# Altium footprint library slave-mc33771c.PcbLib: 66 footprints (part 2 of 5)
Each footprint in its own frame and in the unit in brackets; x right, y up, seen from the top. Pads: shape width x height; smd on the part's side, far side on the other; paste and mask are expansions set on the pad; w line width, h text height; cw(c..) or ccw(c..) is an arc to the next point about the centre after c.
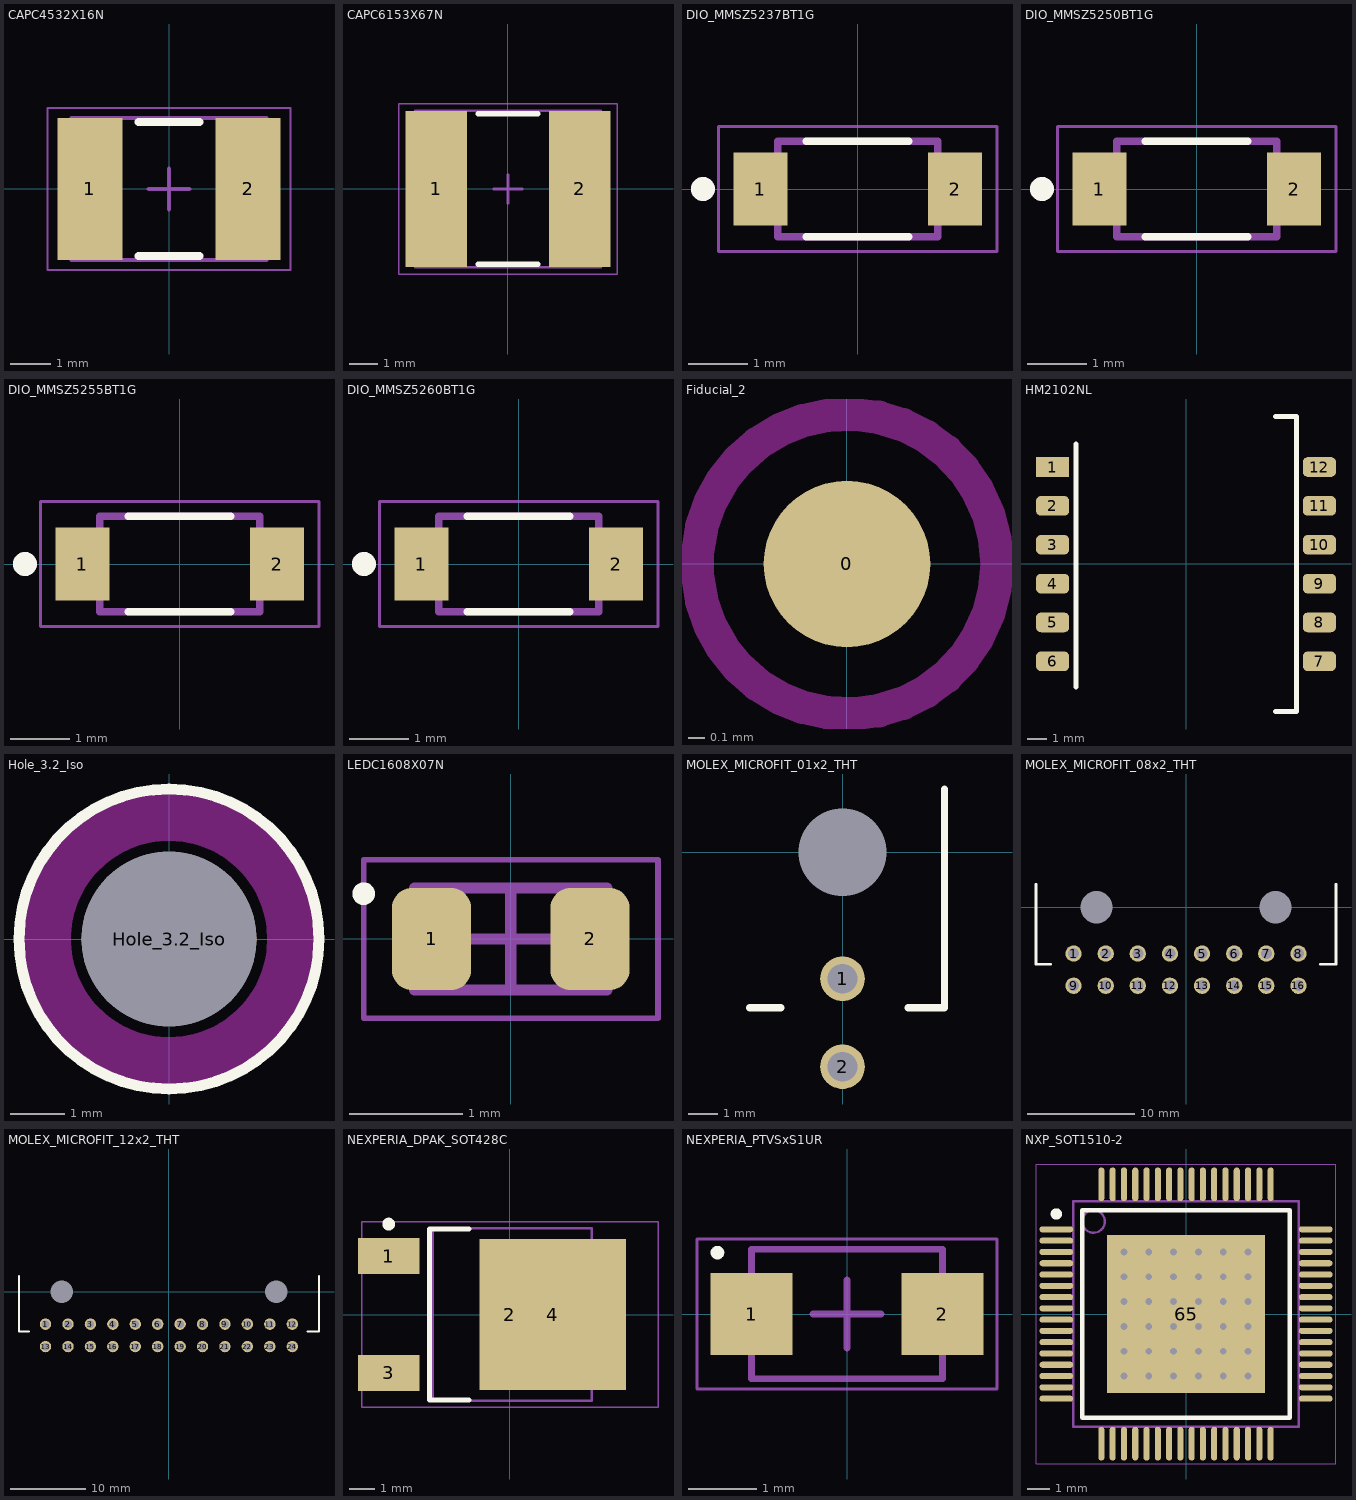
[diagram p1: the footprints below, top view; thin cyan lines are the x and y axes]

## CAPC4532X16N [mm] "Chip Capacitor, 2-Leads, Body 4,50x3,20mm, IPC Medium Density"
height 1.55
pads (2):
  rect 1.6x3.5 smd: 1(-1.95,0) 2(1.95,0)
Top Overlay:
  lines w0.2: -0.75,-1.65 0.75,-1.65 ; -0.75,1.65 0.75,1.65
Mechanical 13:
  lines w0.1: -2.4,-1.75 -2.4,1.75 2.4,1.75 2.4,-1.75 -2.4,-1.75
Mechanical 15:
  lines w0.05: -3,-2 -3,2 3,2 3,-2 -3,-2
  lines w0.1: -0.5,0 0.5,0 ; 0,-0.5 0,0.5
3D body "CAPC4532X16N.step": height 1.55, standoff 0, extent -2.4,-1.75 2.4,1.75

## CAPC6153X67N [mm] "Chip Capacitor, 2-Leads, Body 6,10x5,30mm, IPC Medium Density"
height 6.7
pads (2):
  rect 2.15x5.5 smd: 1(-2.525,0) 2(2.525,0)
Top Overlay:
  lines w0.2: -1.05,-2.65 1.05,-2.65 ; -1.05,2.65 1.05,2.65
Mechanical 13:
  lines w0.1: -3.25,-2.75 3.25,-2.75 3.25,2.75 -3.25,2.75 -3.25,-2.75
Mechanical 15:
  lines w0.05: -3.85,-3 3.85,-3 3.85,3 -3.85,3 -3.85,-3
  lines w0.1: -0.5,0 0.5,0 ; 0,-0.5 0,0.5
3D body "CAPC6153X67N.step": height 6.7, standoff 0, extent -3.25,-2.75 3.25,2.75

## DIO_MMSZ5237BT1G [mm]
height 1.35
pads (2):
  rect 0.91x1.22 smd paste+0 mask+0.102: 1(-1.635,0) 2(1.635,0)
Top Overlay:
  circle w0.2: c-2.6,0 r0.1
  lines w0.127: -0.86,-0.8 0.86,-0.8 ; -0.86,0.8 0.86,0.8
Mechanical 13:
  circle w0.2: c-2.6,0 r0.1
  lines w0.127: -1.345,-0.8 -1.345,0.8 1.345,0.8 1.345,-0.8 -1.345,-0.8
Mechanical 15:
  lines w0.05: -2.34,-1.05 2.34,-1.05 2.34,1.05 -2.34,1.05 -2.34,-1.05
3D body "step_temp.STEP": height 1.35, standoff 0, extent -1.84,-0.8 1.84,0.8

## DIO_MMSZ5250BT1G [mm]
height 1.35
pads (2):
  rect 0.91x1.22 smd paste+0 mask+0.102: 1(-1.635,0) 2(1.635,0)
Top Overlay:
  circle w0.2: c-2.6,0 r0.1
  lines w0.127: -0.86,-0.8 0.86,-0.8 ; -0.86,0.8 0.86,0.8
Mechanical 13:
  circle w0.2: c-2.6,0 r0.1
  lines w0.127: -1.345,-0.8 1.345,-0.8 1.345,0.8 -1.345,0.8 -1.345,-0.8
Mechanical 15:
  lines w0.05: -2.34,-1.05 -2.34,1.05 2.34,1.05 2.34,-1.05 -2.34,-1.05
3D body "step_temp.STEP": height 1.35, standoff 0, extent -1.84,-0.8 1.84,0.8

## DIO_MMSZ5255BT1G [mm]
height 1.35
pads (2):
  rect 0.91x1.22 smd paste+0 mask+0.102: 1(-1.635,0) 2(1.635,0)
Top Overlay:
  circle w0.2: c-2.6,0 r0.1
  lines w0.127: -0.86,-0.8 0.86,-0.8 ; -0.86,0.8 0.86,0.8
Mechanical 13:
  circle w0.2: c-2.6,0 r0.1
  lines w0.127: -1.345,-0.8 1.345,-0.8 1.345,0.8 -1.345,0.8 -1.345,-0.8
Mechanical 15:
  lines w0.05: -2.34,-1.05 -2.34,1.05 2.34,1.05 2.34,-1.05 -2.34,-1.05
3D body "step_temp.STEP": height 1.35, standoff 0, extent -1.84,-0.8 1.84,0.8

## DIO_MMSZ5260BT1G [mm]
height 1.35
pads (2):
  rect 0.91x1.22 smd paste+0 mask+0.102: 1(-1.635,0) 2(1.635,0)
Top Overlay:
  circle w0.2: c-2.6,0 r0.1
  lines w0.127: -0.86,-0.8 0.86,-0.8 ; -0.86,0.8 0.86,0.8
Mechanical 13:
  circle w0.2: c-2.6,0 r0.1
  lines w0.127: -1.345,-0.8 1.345,-0.8 1.345,0.8 -1.345,0.8 -1.345,-0.8
Mechanical 15:
  lines w0.05: -2.34,-1.05 -2.34,1.05 2.34,1.05 2.34,-1.05 -2.34,-1.05
3D body "step_temp.STEP": height 1.35, standoff 0, extent -1.84,-0.8 1.84,0.8

## Fiducial_2 [mm] "Fiducial Round 1mm"
pads (1):
  round 1 smd paste-0.5 mask+0.5: 0(0,0)
Top Layer keep-out:
  circle w0.2: c0,0 r0.9

## HM2102NL [mil]
height 197
pads (12):
  rect 67.5x40 smd: 1(-271.65,196.85)
  rrect50% 67.5x40 smd: 2(-271.65,117.85) 3(-271.65,38.85) 4(-271.65,-40.15) 5(-271.65,-119.15) 6(-271.65,-198.15) 7(270.85,-198.15) 8(270.85,-119.15) 9(270.85,-40.15) 10(270.85,38.85) 11(270.85,117.85) 12(270.85,196.85)
Top Overlay:
  lines w10: -224.41,-250.59 -224.41,243.75 ; 181.25,-300.04 224.41,-300.04 ; 181.28,299.41 224.41,299.21 224.41,-299.21
3D body: height 196.85, standoff 9.84, extent -224.41,-299.21 224.41,299.21

## Hole_3.2_Iso [mm]
pads (1):
  round 3.2 hole 3.2 unplated: Hole_3.2_Iso(0,0)
Top Overlay:
  circle w0.2: c0,0 r2.75
Bottom Overlay:
  circle w0.2: c0,0 r2.75
Keep-Out Layer:
  circle w1: c0,0 r2.3

## LEDC1608X07N [mm] "LED, 2-Leads, Body 1,60x0,80mm, IPC Medium Density"
height 0.7
pads (2):
  rrect50% 0.7x0.9 smd: 1(-0.7,0) 2(0.7,0)
Top Overlay:
  circle w0.1: c-1.3,0.4 r0.05
Mechanical 13:
  lines w0.1: -0.85,-0.45 -0.85,0.45 0.85,0.45 0.85,-0.45 -0.85,-0.45
Mechanical 15:
  lines w0.05: -1.3,-0.7 -1.3,0.7 1.3,0.7 1.3,-0.7 -1.3,-0.7
  lines w0.1: -0.45,0 0.45,0 ; 0,-0.45 0,0.45
3D body "STEP-WL-SMCW-0603-rev1.stp": height 0.7, standoff 0, extent -0.8,-0.4 0.8,0.4

## MOLEX_MICROFIT_01x2_THT [mil] "Micro-Fit 3.0 Right Angle Header, 3.00mm Pitch, Dual Row, 2 Circuits, with Snap-in Plastic Peg PCB Lock, Tin, Glow Wire Capable, Black, 43045-0200"
height 345
pads (3):
  round 60 hole 40: 1(0,-170) 2(0,-287.99)
  round 39.37 hole 117.99 unplated paste-99999 mask+4: ""(0,0)
Top Overlay:
  lines w10: -125,-209.02 -83,-209.02 ; 88,-209.02 137,-209.02 137,85
3D body "430450200.stp": height 345.35, standoff -125.12, extent -140.75,-300.95 140.75,180.94

## MOLEX_MICROFIT_08x2_THT [mil] "Micro-Fit 3.0 Right Angle Header, 3.00mm Pitch, Dual Row, 16 Circuits, with Snap-in Plastic Peg PCB Lock, Tin, Glow Wire Capable, Black, 43045-1600"
height 345
pads (18):
  round 60 hole 40: 1(-412.99,-170) 2(-295,-170) 3(-177.01,-170) 4(-59.02,-170) 5(59.02,-170) 6(177.01,-170) 7(295,-170) 8(412.99,-170) 9(-412.99,-287.99) 10(-295,-287.99) 11(-177.01,-287.99) 12(-59.02,-287.99) 13(59.02,-287.99) 14(177.01,-287.99) 15(295,-287.99) 16(412.99,-287.99)
  round 39.37 hole 117.99 unplated paste-99999 mask+4: ""(-328.5,0) ""(328.5,0)
Top Overlay:
  lines w10: -551,85 -551,-209.02 -497,-209.02 ; 494,-209.02 551,-209.02 551,85
3D body "430451600.stp": height 345.35, standoff -125.12, extent -554.13,-300.95 554.13,180.94

## MOLEX_MICROFIT_12x2_THT [mil] "Micro-Fit 3.0 Right Angle Header, 3.00mm Pitch, Dual Row, 24 Circuits, with Snap-in Plastic Peg PCB Lock, Tin, Glow Wire Capable, Black, 43045-2400"
height 345
pads (26):
  round 60 hole 40: 1(-649.49,-170) 2(-530.98,-170) 3(-412.99,-170) 4(-295,-170) 5(-177.01,-170) 6(-59.02,-170) 7(59.02,-170) 8(177.01,-170) 9(295,-170) 10(412.99,-170) 11(530.98,-170) 12(649.49,-170) 13(-649.49,-287.99) 14(-530.98,-287.99) 15(-412.99,-287.99) 16(-295,-287.99) 17(-177.01,-287.99) 18(-59.02,-287.99) 19(59.02,-287.99) 20(177.01,-287.99) 21(295,-287.99) 22(412.99,-287.99) 23(530.98,-287.99) 24(649.49,-287.99)
  round 39.37 hole 117.99 unplated paste-99999 mask+4: ""(-565,0) ""(565,0)
Top Overlay:
  lines w10: -789,85 -789,-209.02 -735,-209.02 ; 729,-209.02 790,-209.02 790,85
3D body "430452400.stp": height 345.35, standoff -125.12, extent -790.36,-300.95 790.36,180.94

## NEXPERIA_DPAK_SOT428C [mm] "D-PAK, 3-Pads, Body 6,21x6,73mm (max), IPC Medium Density"
height 2.38
pads (4):
  rect 2.4x1.4 smd paste-10: 1(-4.75,2.29) 3(-4.75,-2.29)
  rect 1.4x2.4 smd paste-10: 2(0,0)
  rect 5.75x5.9 smd paste-10: 4(1.675,0)
Top Overlay:
  circle w0.25: c-4.75,3.54 r0.125
  lines w0.2: -1.6,-3.35 -3.15,-3.35 -3.15,3.35 -1.6,3.35
Top Paste:
  rectangle: -4.6,1.64 -3.6,2.94
  region: -4.9,2.94 -5.9,2.94 -5.9,1.64 -4.9,1.64
  rectangle: -4.6,-2.94 -3.6,-1.64
  region: -4.9,-1.64 -5.9,-1.64 -5.9,-2.94 -4.9,-2.94
  region: 2.175,0.9 1.175,0.9 1.175,-0.9 2.175,-0.9
  region: 2.175,2.901 1.175,2.901 1.175,1.101 2.175,1.101
  region: 2.175,-1.099 1.175,-1.099 1.175,-2.899 2.175,-2.899
  region: -0.15,0.9 -1.15,0.9 -1.15,-0.9 -0.15,-0.9
  region: -0.151,2.9 -1.151,2.9 -1.151,1.1 -0.151,1.1
  region: -0.151,-1.1 -1.151,-1.1 -1.151,-2.9 -0.151,-2.9
  region: 4.5,0.9 3.5,0.9 3.5,-0.9 4.5,-0.9
  region: 4.5,2.901 3.5,2.901 3.5,1.101 4.5,1.101
  region: 4.5,-1.099 3.5,-1.099 3.5,-2.899 4.5,-2.899
Mechanical 13:
  lines w0.1: -3.014,-3.375 -3.014,3.375 3.206,3.375 3.206,-3.375 -3.014,-3.375
Mechanical 15:
  lines w0.05: -5.8,-3.625 -5.8,3.625 5.8,3.625 5.8,-3.625 -5.8,-3.625
  lines w0.1: -0.5,0 0.5,0 ; 0,-0.5 0,0.5
3D body "NEXPERIA_DPAK_SOT428C.step": height 2.38, standoff 0, extent -5.894,-3.375 4.106,3.375

## NEXPERIA_PTVSxS1UR [mm] "SODFL, 2-Leads, Body 1,70x3,50mm, IPC Medium Density"
height 1.1
pads (2):
  rect 1.2x1.2 smd: 1(-1.4,0) 2(1.4,0)
Top Overlay:
  circle w0.1: c-1.9,0.9 r0.05
Mechanical 13:
  lines w0.1: -1.4,-0.95 1.4,-0.95 1.4,0.95 -1.4,0.95 -1.4,-0.95
Mechanical 15:
  lines w0.05: -2.2,-1.1 2.2,-1.1 2.2,1.1 -2.2,1.1 -2.2,-1.1
  lines w0.1: -0.5,0 0.5,0 ; 0,-0.5 0,0.5
3D body "NEXPERIA_PTVSxS1UR.step": height 1.1, standoff 0, extent -1.75,-0.95 1.75,0.95

## NXP_SOT1510-2 [mm] "TSQFP, 64-Leads, Body 10,00x10,00mm, Pitch 0,50mm, Thermal Pad 7,00x7,00mm, IPC Medium Density"
height 1.6
pads (65):
  oval 1.5x0.27 smd: 1(-5.75,3.75) 2(-5.75,3.25) 3(-5.75,2.75) 4(-5.75,2.25) 5(-5.75,1.75) 6(-5.75,1.25) 7(-5.75,0.75) 8(-5.75,0.25) 9(-5.75,-0.25) 10(-5.75,-0.75) 11(-5.75,-1.25) 12(-5.75,-1.75) 13(-5.75,-2.25) 14(-5.75,-2.75) 15(-5.75,-3.25) 16(-5.75,-3.75) 33(5.75,-3.75) 34(5.75,-3.25) 35(5.75,-2.75) 36(5.75,-2.25) 37(5.75,-1.75) 38(5.75,-1.25) 39(5.75,-0.75) 40(5.75,-0.25) 41(5.75,0.25) 42(5.75,0.75) 43(5.75,1.25) 44(5.75,1.75) 45(5.75,2.25) 46(5.75,2.75) 47(5.75,3.25) 48(5.75,3.75)
  oval 0.27x1.5 smd: 17(-3.75,-5.75) 18(-3.25,-5.75) 19(-2.75,-5.75) 20(-2.25,-5.75) 21(-1.75,-5.75) 22(-1.25,-5.75) 23(-0.75,-5.75) 24(-0.25,-5.75) 25(0.25,-5.75) 26(0.75,-5.75) 27(1.25,-5.75) 28(1.75,-5.75) 29(2.25,-5.75) 30(2.75,-5.75) 31(3.25,-5.75) 32(3.75,-5.75) 49(3.75,5.75) 50(3.25,5.75) 51(2.75,5.75) 52(2.25,5.75) 53(1.75,5.75) 54(1.25,5.75) 55(0.75,5.75) 56(0.25,5.75) 57(-0.25,5.75) 58(-0.75,5.75) 59(-1.25,5.75) 60(-1.75,5.75) 61(-2.25,5.75) 62(-2.75,5.75) 63(-3.25,5.75) 64(-3.75,5.75)
  rect 7x7 smd: 65(0,0)
via 2.75,-2.75 diameter 0.5 hole 0.3
via 1.65,-2.75 diameter 0.5 hole 0.3
via 0.55,-2.75 diameter 0.5 hole 0.3
via -0.55,-2.75 diameter 0.5 hole 0.3
via -1.65,-2.75 diameter 0.5 hole 0.3
via -2.75,-2.75 diameter 0.5 hole 0.3
via 2.75,-1.65 diameter 0.5 hole 0.3
via 1.65,-1.65 diameter 0.5 hole 0.3
via 0.55,-1.65 diameter 0.5 hole 0.3
via -0.55,-1.65 diameter 0.5 hole 0.3
via -1.65,-1.65 diameter 0.5 hole 0.3
via -2.75,-1.65 diameter 0.5 hole 0.3
via 2.75,-0.55 diameter 0.5 hole 0.3
via 1.65,-0.55 diameter 0.5 hole 0.3
via 0.55,-0.55 diameter 0.5 hole 0.3
via -0.55,-0.55 diameter 0.5 hole 0.3
via -1.65,-0.55 diameter 0.5 hole 0.3
via -2.75,-0.55 diameter 0.5 hole 0.3
via 2.75,0.55 diameter 0.5 hole 0.3
via 1.65,0.55 diameter 0.5 hole 0.3
via 0.55,0.55 diameter 0.5 hole 0.3
via -0.55,0.55 diameter 0.5 hole 0.3
via -1.65,0.55 diameter 0.5 hole 0.3
via -2.75,0.55 diameter 0.5 hole 0.3
via 2.75,1.65 diameter 0.5 hole 0.3
via 1.65,1.65 diameter 0.5 hole 0.3
via 0.55,1.65 diameter 0.5 hole 0.3
via -0.55,1.65 diameter 0.5 hole 0.3
via -1.65,1.65 diameter 0.5 hole 0.3
via -2.75,1.65 diameter 0.5 hole 0.3
via 2.75,2.75 diameter 0.5 hole 0.3
via 1.65,2.75 diameter 0.5 hole 0.3
via 0.55,2.75 diameter 0.5 hole 0.3
via -0.55,2.75 diameter 0.5 hole 0.3
via -1.65,2.75 diameter 0.5 hole 0.3
via -2.75,2.75 diameter 0.5 hole 0.3
Top Overlay:
  circle w0.25: c-5.75,4.435 r0.125
  lines w0.2: -4.6,-4.6 4.6,-4.6 4.6,4.6 -4.6,4.6 -4.6,-4.6
Top Paste:
  rectangle: 0.201,-2.6 2.601,-0.2
  rectangle: -2.599,-2.6 -0.199,-0.2
  rectangle: 0.201,0.2 2.601,2.6
  rectangle: -2.599,0.2 -0.199,2.6
Mechanical 13:
  circle w0.1: c-4.1,4.1 r0.5
  lines w0.1: -5,-5 5,-5 5,5 -5,5 -5,-5
Mechanical 15:
  lines w0.05: -6.65,-6.65 6.65,-6.65 6.65,6.65 -6.65,6.65 -6.65,-6.65
  lines w0.1: -0.5,0 0.5,0 ; 0,-0.5 0,0.5
3D body "NXP_SOT1510-2.step": height 1.6, standoff 0, extent -6,-6 6,6